# Altium footprint library HSS 2026 PCB Kutubhane.PcbLib: 46 footprints (part 1 of 3)
Each footprint in its own frame and in the unit in brackets; x right, y up, seen from the top. Pads: shape width x height; smd on the part's side, far side on the other; paste and mask are expansions set on the pad; w line width, h text height; cw(c..) or ccw(c..) is an arc to the next point about the centre after c.
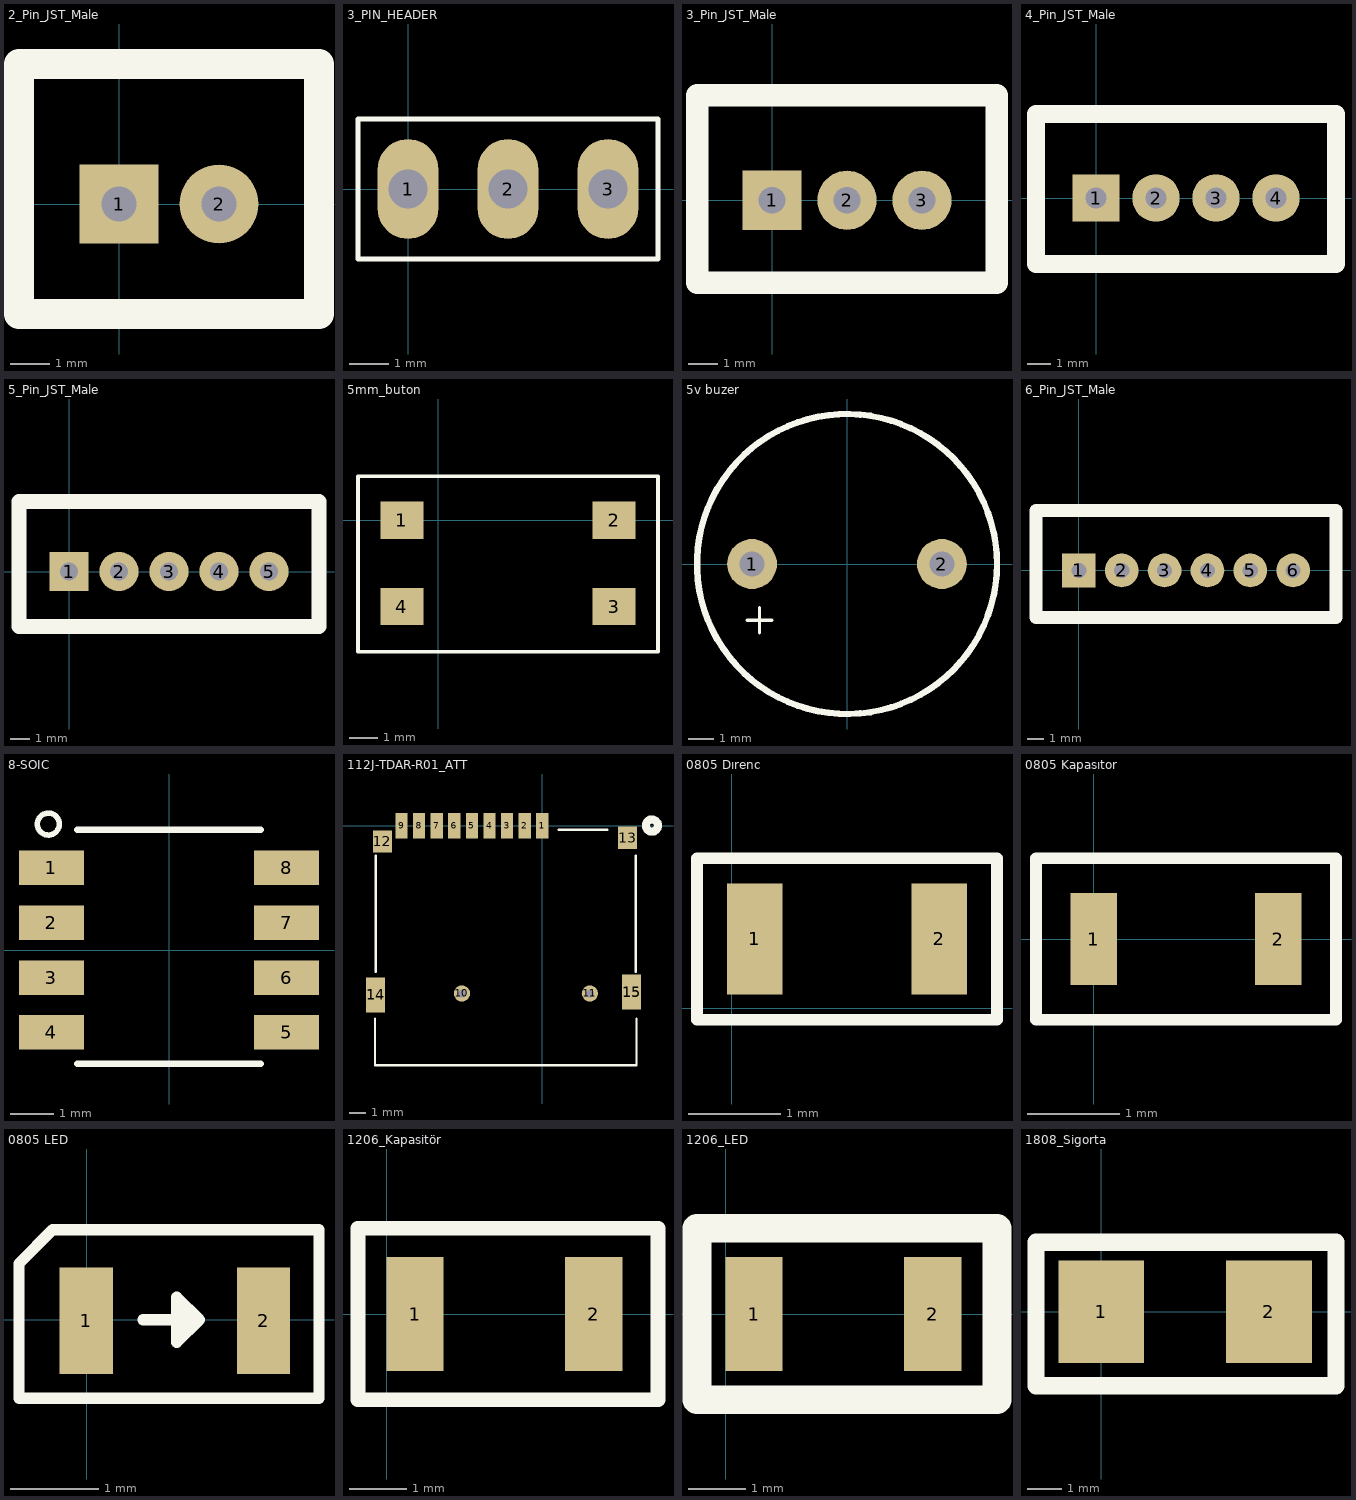
[diagram p0: the footprints below, top view; thin cyan lines are the x and y axes]

## 2_Pin_JST_Male [mm]
pads (2):
  rect 2x2 hole 0.9 mask+0.05: 1(0,0)
  round 2 hole 0.9 mask+0.05: 2(2.54,0)
Top Overlay:
  lines w0.762: -2.54,-2.794 -2.54,3.556 5.08,3.556 5.08,-2.794 -2.54,-2.794
3D body "JST - XH - Thru (V) - 2Pin - 2.54mm.stp": height 7.21, standoff -3, extent -2.337,-2.489 4.877,3.353

## 3_PIN_HEADER [mm]
pads (3):
  oval 1.54x2.54 hole 1 paste-1 mask+0.102: 1(0,0) 2(2.54,0) 3(5.08,0)
Top Overlay:
  lines w0.127: -1.27,-1.778 6.35,-1.778 6.35,1.778 -1.27,1.778 -1.27,-1.778
3D body "1x3 Male Pin Header.STEP": height 10.54, standoff -3, extent -1.272,-1.27 6.353,1.23

## 3_Pin_JST_Male [mm]
pads (3):
  rect 2x2 hole 0.9 mask+0.05: 1(0,0)
  round 2 hole 0.9 mask+0.05: 2(2.54,0) 3(5.08,0)
Top Overlay:
  lines w0.762: -2.54,-2.794 -2.54,3.556 7.62,3.556 7.62,-2.794 -2.54,-2.794
3D body "JST - XH - Thru (V) - 3Pin - 2.54mm.stp": height 7.21, standoff -3, extent -2.337,-2.489 7.417,3.353

## 4_Pin_JST_Male [mm]
pads (4):
  rect 2x2 hole 0.9 mask+0.05: 1(0,0)
  round 2 hole 0.9 mask+0.05: 2(2.54,0) 3(5.08,0) 4(7.62,0)
Top Overlay:
  lines w0.762: -2.54,-2.794 10.16,-2.794 10.16,3.556 -2.54,3.556 -2.54,-2.794
3D body "JST - XH - Thru (V) - 4Pin - 2.54mm.stp": height 7.21, standoff -3, extent -2.337,-2.489 9.957,3.353

## 5_Pin_JST_Male [mm]
pads (5):
  rect 2x2 hole 0.9 mask+0.05: 1(0,0)
  round 2 hole 0.9 mask+0.05: 2(2.54,0) 3(5.08,0) 4(7.62,0) 5(10.16,0)
Top Overlay:
  lines w0.762: -2.54,-2.794 12.7,-2.794 12.7,3.556 -2.54,3.556 -2.54,-2.794
3D body "JST - XH - Thru (V) - 5Pin - 2.54mm.stp": height 7.21, standoff -3, extent -2.337,-2.489 12.497,3.353

## 5mm_buton [mm]
pads (4):
  rect 1.5x1.3 smd paste-1 mask+0.508: 1(-1.27,0) 2(6.096,0) 3(6.096,-3) 4(-1.27,-3)
Top Overlay:
  lines w0.127: -2.794,-4.572 -2.794,1.524 7.62,1.524 7.62,-4.572 -2.794,-4.572
3D body "Tact Switch 4.5mm SMT.step": height 4.2, standoff 0, extent -1.21,-3.774 6.29,0.726

## 5v buzer [mm]
pads (2):
  round 2 hole 1 mask+0.05: 1(-3.8,0) 2(3.8,0)
Top Overlay:
  circle w0.254: c0,0 r6.005
  lines w0.127: -4,-2.25 -3,-2.25 ; -3.5,-2.75 -3.5,-1.75
3D body "Buzzer 5v.stp": height 10, standoff -5.7, extent -5.873,-6 6.124,5.998

## 6_Pin_JST_Male [mm]
pads (6):
  rect 2x2 hole 0.9 mask+0.05: 1(0,0)
  round 2 hole 0.9 mask+0.05: 2(2.54,0) 3(5.08,0) 4(7.62,0) 5(10.16,0) 6(12.7,0)
Top Overlay:
  lines w0.762: -2.54,-2.794 -2.54,3.556 15.24,3.556 15.24,-2.794 -2.54,-2.794
3D body "JST - XH - Thru (V) - 6Pin - 2.54mm.stp": height 7.21, standoff -3, extent -2.337,-2.54 15.037,3.302

## 8-SOIC [mm]
pads (8):
  rect 1.5x0.8 smd paste-1 mask+0.2: 1(-2.724,1.905) 2(-2.724,0.635) 3(-2.724,-0.635) 4(-2.724,-1.905) 5(2.724,-1.905) 6(2.724,-0.635) 7(2.724,0.635) 8(2.724,1.905)
Top Overlay:
  circle w0.127: c-2.794,2.921 r0.254
  lines w0.152: -2.121,-2.629 2.121,-2.629 ; -2.121,2.794 2.121,2.794
3D body "21-0041B_8_MXM.step": height 1.76, standoff 0, extent -3.099,-2.502 3.099,2.502

## 112J-TDAR-R01_ATT [mil]
pads (15):
  rect 30x63 smd paste+0 mask+0: 1(0,0) 2(-43.31,0) 3(-86.61,0) 4(-129.92,0) 5(-173.23,0) 6(-216.54,0) 7(-259.84,0) 8(-303.15,0) 9(-346.46,0)
  round 40 / inner round 60 / far side round 40 hole 20 paste-20 mask-20: 10(-197.83,-413.39) 11(117.13,-413.39)
  rect 47x55 smd paste-27.5 mask+0: 12(-393.7,-39) 13(210,-30)
  rect 47.24x86.61 smd paste-43.31 mask+0: 14(-410.43,-416.96) 15(220,-410)
Top Overlay:
  circle w20: c270,0 r15
  lines w6: -411.87,-475.86 -411.87,-590 232.13,-590 232.13,-475.86 ; -410,-360 -410,-74.28 ; 40.63,-10 160,-10 ; 230,-360 230,-74.28
3D body "112J-TDAR-R01.stp": height 72.83, standoff -23.62, extent -409.53,-580.87 224.33,9.79

## 0805 Dırenc [mm]
pads (2):
  rect 0.6x1.2 smd paste-1 mask+0.102: 1(0.25,0.75) 2(2.25,0.75)
Top Overlay:
  lines w0.127: -0.375,-0.125 2.875,-0.125 2.875,1.625 -0.375,1.625 -0.375,-0.125
3D body "10k 5%.STEP": height 0.43, standoff -0.02, extent 0.191,0.133 2.191,1.383

## 0805 Kapasıtor [mm]
pads (2):
  rect 0.5x1 smd paste-1 mask+0.102: 1(0,0) 2(2,0)
Top Overlay:
  lines w0.127: -0.625,-0.875 2.625,-0.875 2.625,0.875 -0.625,0.875 -0.625,-0.875
3D body "Ceramic_Capacitor_0805_h24mil.step": height 0.61, standoff 0.01, extent 0.014,-0.621 2.014,0.629

## 0805 LED [mm]
pads (2):
  rect 0.6x1.2 smd paste-1 mask+0.102: 1(-0.004,-0.012) 2(1.996,-0.012)
Top Overlay:
  region: 1.27,0 1.016,0.254 1.016,-0.254
  lines w0.127: 0.635,0 1.27,0 ; 1.27,0 1.016,0.254 1.016,-0.254 1.27,0 ; -0.762,-0.887 2.621,-0.887 2.621,1.016 -0.381,1.016 -0.762,0.635 -0.762,-0.887
3D body "User Library-CHIPLED-0805.sldprt": height 0.9, standoff -0.01, extent -0.034,-0.675 2.066,0.675

## 1206_Kapasitör [mm]
pads (2):
  rect 1x2 smd mask+0.05: 1(0.5,0) 2(3.625,0)
Top Overlay:
  lines w0.254: -0.5,-1.5 4.75,-1.5 4.75,1.5 -0.5,1.5 -0.5,-1.5
3D body "C1206-H1.8.STEP": height 1.5, standoff -0.1, extent 0.366,-0.93 3.566,0.871

## 1206_LED [mm]
pads (2):
  rect 1x2 smd mask+0.05: 1(0.5,0) 2(3.625,0)
Top Overlay:
  lines w0.5: -0.5,-1.5 -0.5,1.5 4.75,1.5 4.75,-1.5 -0.5,-1.5
3D body "LED_1206_Green.stp": height 0.9, standoff 0, extent 0.44,-0.8 3.71,0.85

## 1808_Sigorta [mm]
pads (2):
  rect 2.5x3 smd mask+0.05: 1(0,0) 2(4.9,0)
Top Overlay:
  lines w0.508: -1.905,-2.159 6.858,-2.159 6.858,2.032 -1.905,2.032 -1.905,-2.159
3D body "1808-2410 ?????.STEP": height 2.58, standoff 0.03, extent -0.637,-1.27 5.463,1.27